# Altium schematic symbol library ide_podule-16bit.SchLib: 17 symbols
Pins are listed as number, name and electrical type; pins without a type are passive.

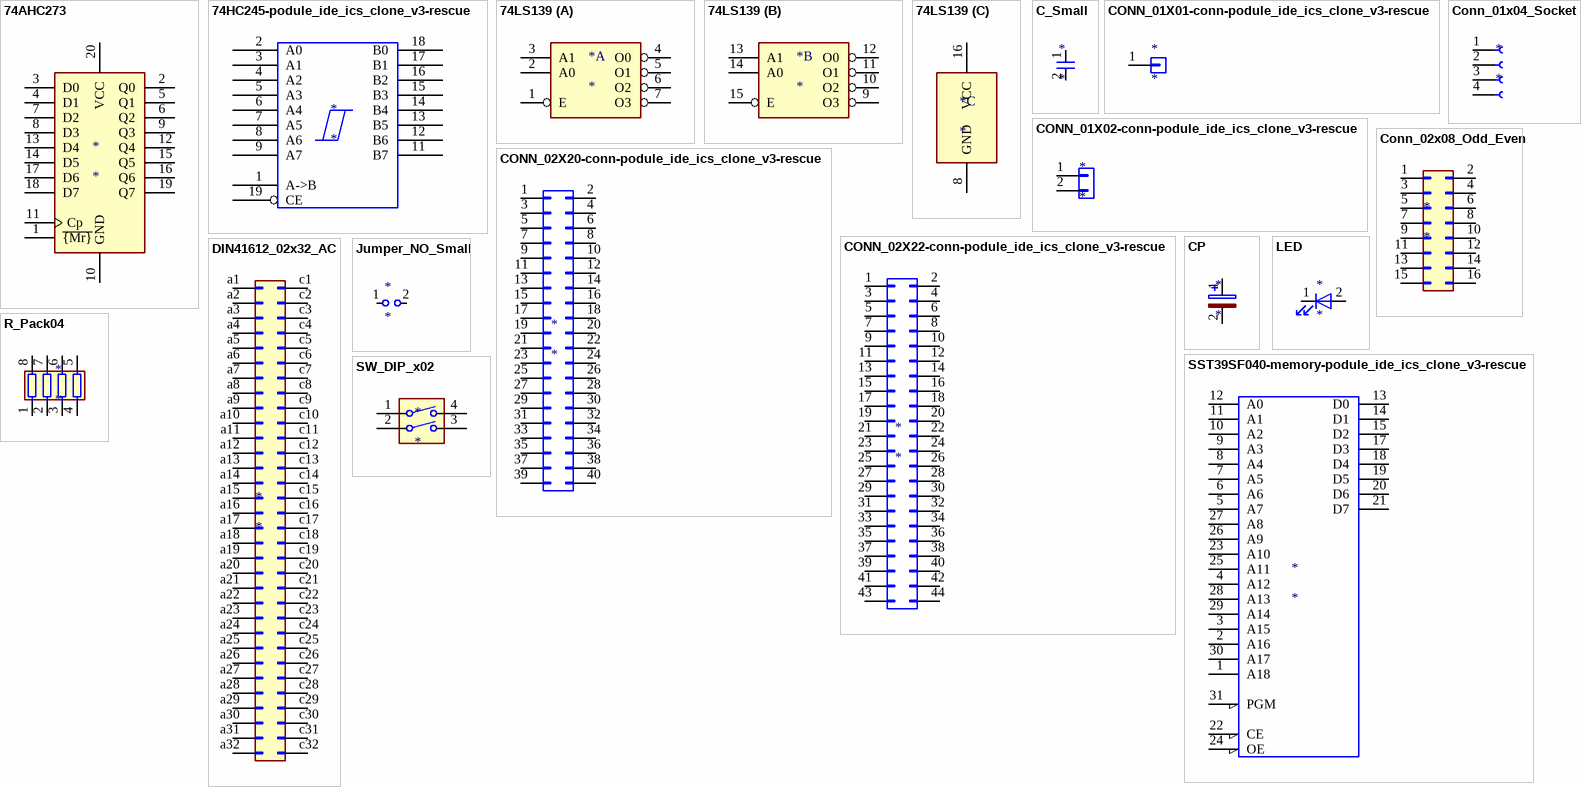
[diagram p0: symbols 74AHC273 to SW_DIP_x02]

## 74AHC273
designator *
pins: 1 ~{{Mr}}, 2 Q0, 3 D0, 4 D1, 5 Q1, 6 Q2, 7 D2, 8 D3, 9 Q3, 10 GND, 11 Cp, 12 Q4, 13 D4, 14 D5, 15 Q5, 16 Q6, 17 D6, 18 D7, 19 Q7, 20 VCC

## 74HC245-podule_ide_ics_clone_v3-rescue
designator *
pins: 1 A->B, 2 A0, 3 A1, 4 A2, 5 A3, 6 A4, 7 A5, 8 A6, 9 A7, 10 GND hidden, 11 B7, 12 B6, 13 B5, 14 B4, 15 B3, 16 B2, 17 B1, 18 B0, 19 CE, 20 VCC hidden

## 74LS139
designator *
part A pins: 1 E, 2 A0, 3 A1, 4 O0, 5 O1, 6 O2, 7 O3
part B pins: 9 O3, 10 O2, 11 O1, 12 O0, 13 A1, 14 A0, 15 E
part C pins: 8 GND, 16 VCC

## C_Small
designator *
pins: 1, 2

## CONN_01X01-conn-podule_ide_ics_clone_v3-rescue
designator *
pins: 1 P1

## CONN_01X02-conn-podule_ide_ics_clone_v3-rescue
designator *
pins: 1 P1, 2 P2

## Conn_01x04_Socket
designator *
pins: 1 Pin_1, 2 Pin_2, 3 Pin_3, 4 Pin_4

## Conn_02x08_Odd_Even
designator *
pins: 1 Pin_1, 2 Pin_2, 3 Pin_3, 4 Pin_4, 5 Pin_5, 6 Pin_6, 7 Pin_7, 8 Pin_8, 9 Pin_9, 10 Pin_10, 11 Pin_11, 12 Pin_12, 13 Pin_13, 14 Pin_14, 15 Pin_15, 16 Pin_16

## CONN_02X20-conn-podule_ide_ics_clone_v3-rescue
designator *
pins: 1 P1, 2 P2, 3 P3, 4 P4, 5 P5, 6 P6, 7 P7, 8 P8, 9 P9, 10 P10, 11 P11, 12 P12, 13 P13, 14 P14, 15 P15, 16 P16, 17 P17, 18 P18, 19 P19, 20 P20, 21 P21, 22 P22, 23 P23, 24 P24, 25 P25, 26 P26, 27 P27, 28 P28, 29 P29, 30 P30, 31 P31, 32 P32, 33 P33, 34 P34, 35 P35, 36 P36, 37 P37, 38 P38, 39 P39, 40 P40

## CONN_02X22-conn-podule_ide_ics_clone_v3-rescue
designator *
pins: 1 P1, 2 P2, 3 P3, 4 P4, 5 P5, 6 P6, 7 P7, 8 P8, 9 P9, 10 P10, 11 P11, 12 P12, 13 P13, 14 P14, 15 P15, 16 P16, 17 P17, 18 P18, 19 P19, 20 P20, 21 P21, 22 P22, 23 P23, 24 P24, 25 P25, 26 P26, 27 P27, 28 P28, 29 P29, 30 P30, 31 P31, 32 P32, 33 P33, 34 P34, 35 P35, 36 P36, 37 P37, 38 P38, 39 P39, 40 P40, 41 P41, 42 P42, 43 P43, 44 P44

## CP
designator *
pins: 1, 2

## DIN41612_02x32_AC
designator *
pins: a1 Pin_a1, a2 Pin_a2, a3 Pin_a3, a4 Pin_a4, a5 Pin_a5, a6 Pin_a6, a7 Pin_a7, a8 Pin_a8, a9 Pin_a9, a10 Pin_a10, a11 Pin_a11, a12 Pin_a12, a13 Pin_a13, a14 Pin_a14, a15 Pin_a15, a16 Pin_a16, a17 Pin_a17, a18 Pin_a18, a19 Pin_a19, a20 Pin_a20, a21 Pin_a21, a22 Pin_a22, a23 Pin_a23, a24 Pin_a24, a25 Pin_a25, a26 Pin_a26, a27 Pin_a27, a28 Pin_a28, a29 Pin_a29, a30 Pin_a30, a31 Pin_a31, a32 Pin_a32, c1 Pin_c1, c2 Pin_c2, c3 Pin_c3, c4 Pin_c4, c5 Pin_c5, c6 Pin_c6, c7 Pin_c7, c8 Pin_c8, c9 Pin_c9, c10 Pin_c10, c11 Pin_c11, c12 Pin_c12, c13 Pin_c13, c14 Pin_c14, c15 Pin_c15, c16 Pin_c16, c17 Pin_c17, c18 Pin_c18, c19 Pin_c19, c20 Pin_c20, c21 Pin_c21, c22 Pin_c22, c23 Pin_c23, c24 Pin_c24, c25 Pin_c25, c26 Pin_c26, c27 Pin_c27, c28 Pin_c28, c29 Pin_c29, c30 Pin_c30, c31 Pin_c31, c32 Pin_c32

## Jumper_NO_Small
designator *
pins: 1, 2

## LED
designator *
pins: 1 K, 2 A

## R_Pack04
designator *
pins: 1 R1.1, 2 R2.1, 3 R3.1, 4 R4.1, 5 R4.2, 6 R3.2, 7 R2.2, 8 R1.2

## SST39SF040-memory-podule_ide_ics_clone_v3-rescue
designator *
pins: 1 A18, 2 A16, 3 A15, 4 A12, 5 A7, 6 A6, 7 A5, 8 A4, 9 A3, 10 A2, 11 A1, 12 A0, 13 D0, 14 D1, 15 D2, 16 GND hidden, 17 D3, 18 D4, 19 D5, 20 D6, 21 D7, 22 CE, 23 A10, 24 OE, 25 A11, 26 A9, 27 A8, 28 A13, 29 A14, 30 A17, 31 PGM, 32 VCC hidden

## SW_DIP_x02
designator *
pins: 1, 2, 3, 4